# EAGLE library part EE16-5 (library madhu)
EE16 5 pin transformer
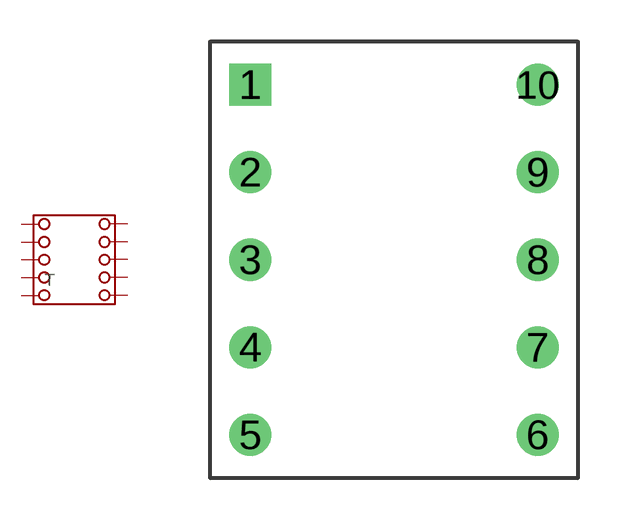
[diagram p52: symbol with the pads of EE16-5; footprint EE16-5]

Designator prefix T

## EE16-5  [EE16-5]
1  1
2  2
3  3
4  4
5  5
6  6
7  7
8  8
9  9
10  10

## Footprint EE16-5 (pad centres in mm)
EE16 ferrite transformer 5 pin
drill 1.016 square: 1 -5.207,6.35
drill 1.016: 2 -5.207,3.175; 3 -5.207,0; 4 -5.207,-3.175; 5 -5.207,-6.35; 6 5.207,-6.35; 7 5.207,-3.175; 8 5.207,0; 9 5.207,3.175; 10 5.207,6.35